# Altium footprint library BS170.PcbLib: 1 footprints
Each footprint in its own frame and in the unit in brackets; x right, y up, seen from the top. Pads: shape width x height; smd on the part's side, far side on the other; paste and mask are expansions set on the pad; w line width, h text height; cw(c..) or ccw(c..) is an arc to the next point about the centre after c.
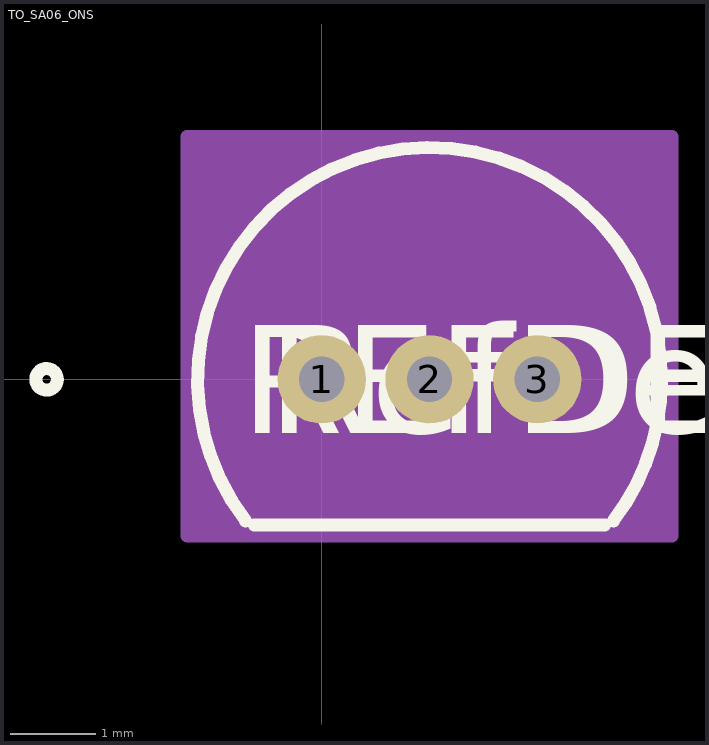
[diagram p0: the footprint, top view; thin cyan lines are the x and y axes]

## TO_SA06_ONS [mil]
pads (3):
  round 41 / inner round 60 / far side round 41 hole 21 paste-20.5 mask+0: 1(0,0) 2(50,0) 3(100,0)
Top Overlay:
  circle w6: c-127.5,0 r5
  lines w6: -35.2,-65.55 cw(c50,0) 157.5,0 cw(c50,0) 135.2,-65.55 ; -31.24,-67.5 131.24,-67.5
  text "RefDes" at -25,-25 h50
  text "REFDES" at -37.5,-25 h50
Mechanical 13:
  circle w0: c-42.5,0 r5
  lines w0: -31.24,-62.5 cw(c50,0) 131.24,-62.5
  lines w1: -31.24,-62.5 131.24,-62.5
  lines w6: -10,0 10,0 ; 0,-10 0,10
  text "RefDes2" at -37.5,-25 h50
Mechanical 15:
  region: 162.5,-72.5 -62.5,-72.5 -62.5,112.5 162.5,112.5
  lines w6: -62.5,-72.5 -62.5,112.5 162.5,112.5 162.5,-72.5 -62.5,-72.5
3D body "TO_SA06_ONS.step": height 210, standoff -144.02, extent -52.39,-42.52 152.39,102.04